# Altium footprint library Terminal_Blocks_Pluggable PCB_5.08mm.PcbLib: 299 footprints (part 3 of 19)
Each footprint in its own frame and in the unit in brackets; x right, y up, seen from the top. Pads: shape width x height; smd on the part's side, far side on the other; paste and mask are expansions set on the pad; w line width, h text height; cw(c..) or ccw(c..) is an arc to the next point about the centre after c.
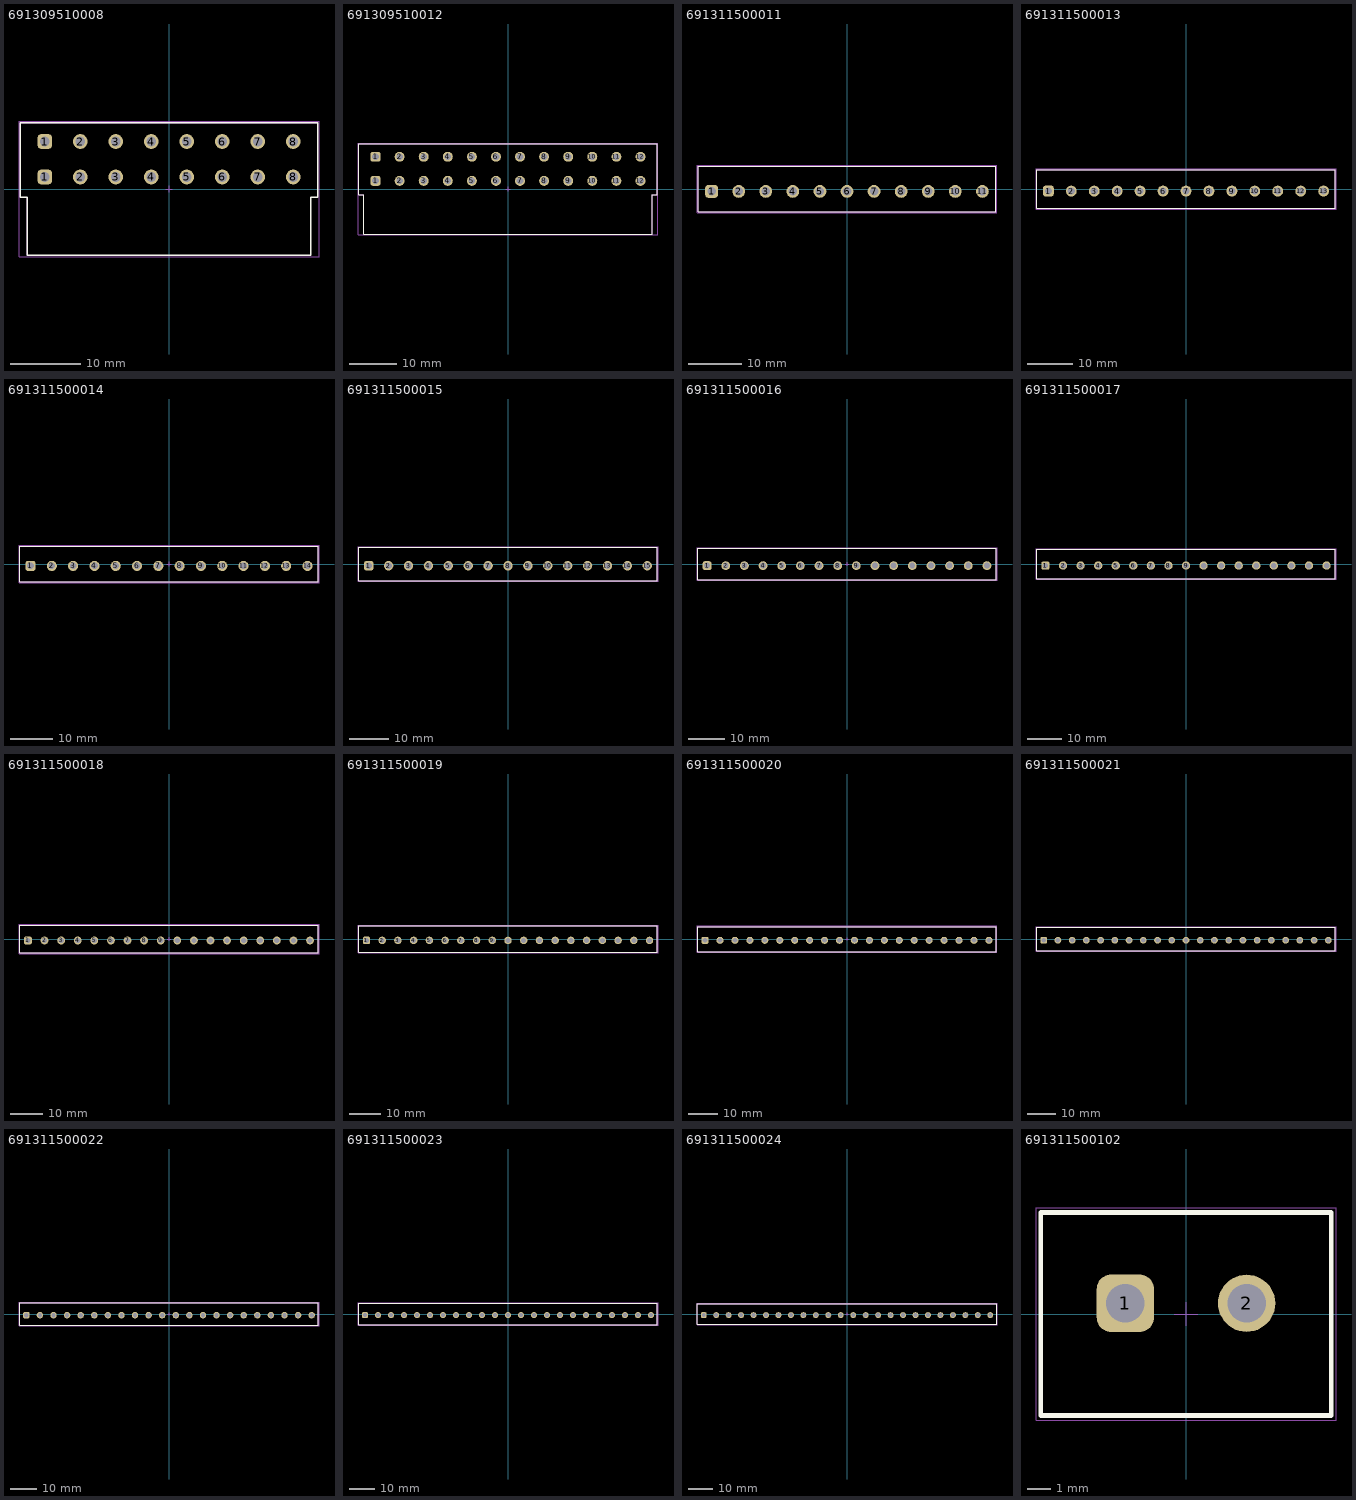
[diagram p2: the footprints below, top view; thin cyan lines are the x and y axes]

## 691309510008 [mm] "5.08 mm Reversed Gender Horizontal PCB Header - 08p"
height 8.6
pads (16):
  rrect50% 2.1x2.1 hole 1.4: 1(-17.78,1.72) 1(-17.78,6.8)
  round 2.1 hole 1.4: 2(-12.7,1.72) 2(-12.7,6.8) 3(-7.62,1.72) 3(-7.62,6.8) 4(-2.54,1.72) 4(-2.54,6.8) 5(2.54,1.72) 5(2.54,6.8) 6(7.62,1.72) 6(7.62,6.8) 7(12.7,1.72) 7(12.7,6.8) 8(17.78,1.72) 8(17.78,6.8)
Top Overlay:
  lines w0.2: -21.28,-1.2 -20.28,-1.2 -20.28,-9.5 20.28,-9.5 20.28,-1.2 21.28,-1.2 21.28,9.5 -21.28,9.5 -21.28,-1.2
Top Designator:
  text ".Designator" at -7.498,-0.5 h1.5
Top Component Outline:
  lines w0.1: -21.28,-1.2 -21.28,9.5 21.28,9.5 21.28,-1.2 20.28,-1.2 20.28,-9.5 -20.28,-9.5 -20.28,-1.2 -21.28,-1.2
Top 3D Body:
  lines w0.1: -21.28,-1.2 -20.28,-1.2 -20.28,-9.5 20.28,-9.5 20.28,-1.2 21.28,-1.2 21.28,9.5 -21.28,9.5 -21.28,-1.2
Top Courtyard:
  lines w0.05: -21.48,-9.7 21.48,-9.7 21.48,9.7 -21.48,9.7 -21.48,-9.7
Top Component Center:
  lines w0.05: -0.5,0 0.5,0 ; 0,-0.5 0,0.5
3D body "691309510008.stp": height 10.94, standoff -3.55, extent -21.28,-9.5 21.28,9.5

## 691309510012 [mm] "5.08 mm Reversed Gender Horizontal PCB Header - 12p"
height 8.6
pads (24):
  rrect50% 2.1x2.1 hole 1.4: 1(-27.94,1.72) 1(-27.94,6.8)
  round 2.1 hole 1.4: 2(-22.86,1.72) 2(-22.86,6.8) 3(-17.78,1.72) 3(-17.78,6.8) 4(-12.7,1.72) 4(-12.7,6.8) 5(-7.62,1.72) 5(-7.62,6.8) 6(-2.54,1.72) 6(-2.54,6.8) 7(2.54,1.72) 7(2.54,6.8) 8(7.62,1.72) 8(7.62,6.8) 9(12.7,1.72) 9(12.7,6.8) 10(17.78,1.72) 10(17.78,6.8) 11(22.86,1.72) 11(22.86,6.8) 12(27.94,1.72) 12(27.94,6.8)
Top Overlay:
  lines w0.2: -31.44,-1.2 -31.44,9.5 31.44,9.5 31.44,-1.2 30.44,-1.2 30.44,-9.5 -30.44,-9.5 -30.44,-1.2 -31.44,-1.2
Top Designator:
  text ".Designator" at -7.498,-0.5 h1.5
Top Component Outline:
  lines w0.1: -31.44,-1.2 -30.44,-1.2 -30.44,-9.5 30.44,-9.5 30.44,-1.2 31.44,-1.2 31.44,9.5 -31.44,9.5 -31.44,-1.2
Top 3D Body:
  lines w0.1: -31.44,-1.2 -31.44,9.5 31.44,9.5 31.44,-1.2 30.44,-1.2 30.44,-9.5 -30.44,-9.5 -30.44,-1.2 -31.44,-1.2
Top Courtyard:
  lines w0.05: -31.64,-9.7 -31.64,9.7 31.64,9.7 31.64,-9.7 -31.64,-9.7
Top Component Center:
  lines w0.05: -0.5,0 0.5,0 ; 0,-0.5 0,0.5
3D body "691309510012.stp": height 10.94, standoff -3.55, extent -31.44,-9.5 31.44,9.5

## 691311500011 [mm] "5,08mm - PCB Headers - Vertical - Opened ends -11p"
height 12
pads (11):
  rrect50% 2.4x2.4 hole 1.6: 1(-25.4,-0.45)
  round 2.4 hole 1.6: 2(-20.32,-0.45) 3(-15.24,-0.45) 4(-10.16,-0.45) 5(-5.08,-0.45) 6(0,-0.45) 7(5.08,-0.45) 8(10.16,-0.45) 9(15.24,-0.45) 10(20.32,-0.45) 11(25.4,-0.45)
Top Overlay:
  lines w0.2: -27.94,-4.25 27.94,-4.25 27.94,4.25 -27.94,4.25 -27.94,-4.25
Top Designator:
  text ".Designator" at -7.498,-0.5 h1.5
Top Component Outline:
  lines w0.1: -27.94,-4.25 -27.94,4.25 27.94,4.25 27.94,-4.25 -27.94,-4.25
Top 3D Body:
  lines w0.1: -27.94,-4.25 27.94,-4.25 27.94,4.25 -27.94,4.25 -27.94,-4.25
Top Courtyard:
  lines w0.05: -28.14,-4.45 28.14,-4.45 28.14,4.45 -28.14,4.45 -28.14,-4.45
Top Component Center:
  lines w0.05: -0.5,0 0.5,0 ; 0,-0.5 0,0.5
3D body "691311500011.stp": height 12.05, standoff -3.95, extent -27.94,-4.25 27.94,4.25

## 691311500013 [mm] "5,08mm - PCB Headers - Vertical - Opened ends -13p"
height 12
pads (13):
  rrect50% 2.4x2.4 hole 1.6: 1(-30.48,-0.45)
  round 2.4 hole 1.6: 2(-25.4,-0.45) 3(-20.32,-0.45) 4(-15.24,-0.45) 5(-10.16,-0.45) 6(-5.08,-0.45) 7(0,-0.45) 8(5.08,-0.45) 9(10.16,-0.45) 10(15.24,-0.45) 11(20.32,-0.45) 12(25.4,-0.45) 13(30.48,-0.45)
Top Overlay:
  lines w0.2: -33.02,-4.25 -33.02,4.25 33.02,4.25 33.02,-4.25 -33.02,-4.25
Top Designator:
  text ".Designator" at -7.498,-0.5 h1.5
Top Component Outline:
  lines w0.1: -33.02,-4.25 33.02,-4.25 33.02,4.25 -33.02,4.25 -33.02,-4.25
Top 3D Body:
  lines w0.1: -33.02,-4.25 -33.02,4.25 33.02,4.25 33.02,-4.25 -33.02,-4.25
Top Courtyard:
  lines w0.05: -33.22,-4.45 -33.22,4.45 33.22,4.45 33.22,-4.45 -33.22,-4.45
Top Component Center:
  lines w0.05: -0.5,0 0.5,0 ; 0,-0.5 0,0.5
3D body "691311500013.stp": height 12.05, standoff -3.95, extent -33.02,-4.25 33.02,4.25

## 691311500014 [mm] "5,08mm - PCB Headers - Vertical - Opened ends -14p"
height 12
pads (14):
  rrect50% 2.4x2.4 hole 1.6: 1(-33.02,-0.45)
  round 2.4 hole 1.6: 2(-27.94,-0.45) 3(-22.86,-0.45) 4(-17.78,-0.45) 5(-12.7,-0.45) 6(-7.62,-0.45) 7(-2.54,-0.45) 8(2.54,-0.45) 9(7.62,-0.45) 10(12.7,-0.45) 11(17.78,-0.45) 12(22.86,-0.45) 13(27.94,-0.45) 14(33.02,-0.45)
Top Overlay:
  lines w0.2: -35.56,-4.25 -35.56,4.25 35.56,4.25 35.56,-4.25 -35.56,-4.25
Top Designator:
  text ".Designator" at -7.498,-0.5 h1.5
Top Component Outline:
  lines w0.1: -35.56,-4.25 35.56,-4.25 35.56,4.25 -35.56,4.25 -35.56,-4.25
Top 3D Body:
  lines w0.1: -35.56,-4.25 -35.56,4.25 35.56,4.25 35.56,-4.25 -35.56,-4.25
Top Courtyard:
  lines w0.05: -35.76,-4.45 -35.76,4.45 35.76,4.45 35.76,-4.45 -35.76,-4.45
Top Component Center:
  lines w0.05: -0.5,0 0.5,0 ; 0,-0.5 0,0.5
3D body "691311500014.stp": height 12.05, standoff -3.95, extent -35.56,-4.25 35.56,4.25

## 691311500015 [mm] "5,08mm - PCB Headers - Vertical - Opened ends -15p"
height 12
pads (15):
  rrect50% 2.4x2.4 hole 1.6: 1(-35.56,-0.45)
  round 2.4 hole 1.6: 2(-30.48,-0.45) 3(-25.4,-0.45) 4(-20.32,-0.45) 5(-15.24,-0.45) 6(-10.16,-0.45) 7(-5.08,-0.45) 8(0,-0.45) 9(5.08,-0.45) 10(10.16,-0.45) 11(15.24,-0.45) 12(20.32,-0.45) 13(25.4,-0.45) 14(30.48,-0.45) 15(35.56,-0.45)
Top Overlay:
  lines w0.2: -38.1,-4.25 38.1,-4.25 38.1,4.25 -38.1,4.25 -38.1,-4.25
Top Designator:
  text ".Designator" at -7.498,-0.5 h1.5
Top Component Outline:
  lines w0.1: -38.1,-4.25 -38.1,4.25 38.1,4.25 38.1,-4.25 -38.1,-4.25
Top 3D Body:
  lines w0.1: -38.1,-4.25 38.1,-4.25 38.1,4.25 -38.1,4.25 -38.1,-4.25
Top Courtyard:
  lines w0.05: -38.3,-4.45 38.3,-4.45 38.3,4.45 -38.3,4.45 -38.3,-4.45
Top Component Center:
  lines w0.05: -0.5,0 0.5,0 ; 0,-0.5 0,0.5
3D body "691311500015.stp": height 12.05, standoff -3.95, extent -38.1,-4.25 38.1,4.25

## 691311500016 [mm] "5,08mm - PCB Headers - Vertical - Opened ends -16p"
height 12
pads (16):
  rrect50% 2.4x2.4 hole 1.6: 1(-38.1,-0.45)
  round 2.4 hole 1.6: 2(-33.02,-0.45) 3(-27.94,-0.45) 4(-22.86,-0.45) 5(-17.78,-0.45) 6(-12.7,-0.45) 7(-7.62,-0.45) 8(-2.54,-0.45) 9(2.54,-0.45) 10(7.62,-0.45) 11(12.7,-0.45) 12(17.78,-0.45) 13(22.86,-0.45) 14(27.94,-0.45) 15(33.02,-0.45) 16(38.1,-0.45)
Top Overlay:
  lines w0.2: -40.64,-4.25 -40.64,4.25 40.64,4.25 40.64,-4.25 -40.64,-4.25
Top Designator:
  text ".Designator" at -7.498,-0.5 h1.5
Top Component Outline:
  lines w0.1: -40.64,-4.25 40.64,-4.25 40.64,4.25 -40.64,4.25 -40.64,-4.25
Top 3D Body:
  lines w0.1: -40.64,-4.25 -40.64,4.25 40.64,4.25 40.64,-4.25 -40.64,-4.25
Top Courtyard:
  lines w0.05: -40.84,-4.45 -40.84,4.45 40.84,4.45 40.84,-4.45 -40.84,-4.45
Top Component Center:
  lines w0.05: -0.5,0 0.5,0 ; 0,-0.5 0,0.5
3D body "691311500016.stp": height 12.05, standoff -3.95, extent -40.64,-4.25 40.64,4.25

## 691311500017 [mm] "5,08mm - PCB Headers - Vertical - Opened ends -17p"
height 12
pads (17):
  rrect50% 2.4x2.4 hole 1.6: 1(-40.64,-0.45)
  round 2.4 hole 1.6: 2(-35.56,-0.45) 3(-30.48,-0.45) 4(-25.4,-0.45) 5(-20.32,-0.45) 6(-15.24,-0.45) 7(-10.16,-0.45) 8(-5.08,-0.45) 9(0,-0.45) 10(5.08,-0.45) 11(10.16,-0.45) 12(15.24,-0.45) 13(20.32,-0.45) 14(25.4,-0.45) 15(30.48,-0.45) 16(35.56,-0.45) 17(40.64,-0.45)
Top Overlay:
  lines w0.2: -43.18,-4.25 43.18,-4.25 43.18,4.25 -43.18,4.25 -43.18,-4.25
Top Designator:
  text ".Designator" at -7.498,-0.5 h1.5
Top Component Outline:
  lines w0.1: -43.18,-4.25 -43.18,4.25 43.18,4.25 43.18,-4.25 -43.18,-4.25
Top 3D Body:
  lines w0.1: -43.18,-4.25 43.18,-4.25 43.18,4.25 -43.18,4.25 -43.18,-4.25
Top Courtyard:
  lines w0.05: -43.38,-4.45 43.38,-4.45 43.38,4.45 -43.38,4.45 -43.38,-4.45
Top Component Center:
  lines w0.05: -0.5,0 0.5,0 ; 0,-0.5 0,0.5
3D body "691311500017.stp": height 12.05, standoff -3.95, extent -43.18,-4.25 43.18,4.25

## 691311500018 [mm] "5,08mm - PCB Headers - Vertical - Opened ends -18p"
height 12
pads (18):
  rrect50% 2.4x2.4 hole 1.6: 1(-43.18,-0.45)
  round 2.4 hole 1.6: 2(-38.1,-0.45) 3(-33.02,-0.45) 4(-27.94,-0.45) 5(-22.86,-0.45) 6(-17.78,-0.45) 7(-12.7,-0.45) 8(-7.62,-0.45) 9(-2.54,-0.45) 10(2.54,-0.45) 11(7.62,-0.45) 12(12.7,-0.45) 13(17.78,-0.45) 14(22.86,-0.45) 15(27.94,-0.45) 16(33.02,-0.45) 17(38.1,-0.45) 18(43.18,-0.45)
Top Overlay:
  lines w0.2: -45.72,-4.25 -45.72,4.25 45.72,4.25 45.72,-4.25 -45.72,-4.25
Top Designator:
  text ".Designator" at -7.498,-0.5 h1.5
Top Component Outline:
  lines w0.1: -45.72,-4.25 45.72,-4.25 45.72,4.25 -45.72,4.25 -45.72,-4.25
Top 3D Body:
  lines w0.1: -45.72,-4.25 -45.72,4.25 45.72,4.25 45.72,-4.25 -45.72,-4.25
Top Courtyard:
  lines w0.05: -45.92,-4.45 -45.92,4.45 45.92,4.45 45.92,-4.45 -45.92,-4.45
Top Component Center:
  lines w0.05: -0.5,0 0.5,0 ; 0,-0.5 0,0.5
3D body "691311500018.stp": height 12.05, standoff -3.95, extent -45.72,-4.25 45.72,4.25

## 691311500019 [mm] "5,08mm - PCB Headers - Vertical - Opened ends -19p"
height 12
pads (19):
  rrect50% 2.4x2.4 hole 1.6: 1(-45.72,-0.45)
  round 2.4 hole 1.6: 2(-40.64,-0.45) 3(-35.56,-0.45) 4(-30.48,-0.45) 5(-25.4,-0.45) 6(-20.32,-0.45) 7(-15.24,-0.45) 8(-10.16,-0.45) 9(-5.08,-0.45) 10(0,-0.45) 11(5.08,-0.45) 12(10.16,-0.45) 13(15.24,-0.45) 14(20.32,-0.45) 15(25.4,-0.45) 16(30.48,-0.45) 17(35.56,-0.45) 18(40.64,-0.45) 19(45.72,-0.45)
Top Overlay:
  lines w0.2: -48.26,-4.25 48.26,-4.25 48.26,4.25 -48.26,4.25 -48.26,-4.25
Top Designator:
  text ".Designator" at -7.498,-0.5 h1.5
Top Component Outline:
  lines w0.1: -48.26,-4.25 -48.26,4.25 48.26,4.25 48.26,-4.25 -48.26,-4.25
Top 3D Body:
  lines w0.1: -48.26,-4.25 48.26,-4.25 48.26,4.25 -48.26,4.25 -48.26,-4.25
Top Courtyard:
  lines w0.05: -48.46,-4.45 48.46,-4.45 48.46,4.45 -48.46,4.45 -48.46,-4.45
Top Component Center:
  lines w0.05: -0.5,0 0.5,0 ; 0,-0.5 0,0.5
3D body "691311500019.stp": height 12.05, standoff -3.95, extent -48.26,-4.25 48.26,4.25

## 691311500020 [mm] "5,08mm - PCB Headers - Vertical - Opened ends -20p"
height 12
pads (20):
  rrect50% 2.4x2.4 hole 1.6: 1(-48.26,-0.45)
  round 2.4 hole 1.6: 2(-43.18,-0.45) 3(-38.1,-0.45) 4(-33.02,-0.45) 5(-27.94,-0.45) 6(-22.86,-0.45) 7(-17.78,-0.45) 8(-12.7,-0.45) 9(-7.62,-0.45) 10(-2.54,-0.45) 11(2.54,-0.45) 12(7.62,-0.45) 13(12.7,-0.45) 14(17.78,-0.45) 15(22.86,-0.45) 16(27.94,-0.45) 17(33.02,-0.45) 18(38.1,-0.45) 19(43.18,-0.45) 20(48.26,-0.45)
Top Overlay:
  lines w0.2: -50.8,-4.25 50.8,-4.25 50.8,4.25 -50.8,4.25 -50.8,-4.25
Top Designator:
  text ".Designator" at -7.498,-0.5 h1.5
Top Component Outline:
  lines w0.1: -50.8,-4.25 -50.8,4.25 50.8,4.25 50.8,-4.25 -50.8,-4.25
Top 3D Body:
  lines w0.1: -50.8,-4.25 50.8,-4.25 50.8,4.25 -50.8,4.25 -50.8,-4.25
Top Courtyard:
  lines w0.05: -51,-4.45 51,-4.45 51,4.45 -51,4.45 -51,-4.45
Top Component Center:
  lines w0.05: -0.5,0 0.5,0 ; 0,-0.5 0,0.5
3D body "691311500020.stp": height 12.05, standoff -3.95, extent -50.8,-4.25 50.8,4.25

## 691311500021 [mm] "5,08mm - PCB Headers - Vertical - Opened ends -21p"
height 12
pads (21):
  rrect50% 2.4x2.4 hole 1.6: 1(-50.8,-0.45)
  round 2.4 hole 1.6: 2(-45.72,-0.45) 3(-40.64,-0.45) 4(-35.56,-0.45) 5(-30.48,-0.45) 6(-25.4,-0.45) 7(-20.32,-0.45) 8(-15.24,-0.45) 9(-10.16,-0.45) 10(-5.08,-0.45) 11(0,-0.45) 12(5.08,-0.45) 13(10.16,-0.45) 14(15.24,-0.45) 15(20.32,-0.45) 16(25.4,-0.45) 17(30.48,-0.45) 18(35.56,-0.45) 19(40.64,-0.45) 20(45.72,-0.45) 21(50.8,-0.45)
Top Overlay:
  lines w0.2: -53.34,-4.25 53.34,-4.25 53.34,4.25 -53.34,4.25 -53.34,-4.25
Top Designator:
  text ".Designator" at -7.498,-0.5 h1.5
Top Component Outline:
  lines w0.1: -53.34,-4.25 -53.34,4.25 53.34,4.25 53.34,-4.25 -53.34,-4.25
Top 3D Body:
  lines w0.1: -53.34,-4.25 53.34,-4.25 53.34,4.25 -53.34,4.25 -53.34,-4.25
Top Courtyard:
  lines w0.05: -53.54,-4.45 53.54,-4.45 53.54,4.45 -53.54,4.45 -53.54,-4.45
Top Component Center:
  lines w0.05: -0.5,0 0.5,0 ; 0,-0.5 0,0.5
3D body "691311500021.stp": height 12.05, standoff -3.95, extent -53.34,-4.25 53.34,4.25

## 691311500022 [mm] "5,08mm - PCB Headers - Vertical - Opened ends -22p"
height 12
pads (22):
  rrect50% 2.4x2.4 hole 1.6: 1(-53.34,-0.45)
  round 2.4 hole 1.6: 2(-48.26,-0.45) 3(-43.18,-0.45) 4(-38.1,-0.45) 5(-33.02,-0.45) 6(-27.94,-0.45) 7(-22.86,-0.45) 8(-17.78,-0.45) 9(-12.7,-0.45) 10(-7.62,-0.45) 11(-2.54,-0.45) 12(2.54,-0.45) 13(7.62,-0.45) 14(12.7,-0.45) 15(17.78,-0.45) 16(22.86,-0.45) 17(27.94,-0.45) 18(33.02,-0.45) 19(38.1,-0.45) 20(43.18,-0.45) 21(48.26,-0.45) 22(53.34,-0.45)
Top Overlay:
  lines w0.2: -55.88,-4.25 -55.88,4.25 55.88,4.25 55.88,-4.25 -55.88,-4.25
Top Designator:
  text ".Designator" at -7.498,-0.5 h1.5
Top Component Outline:
  lines w0.1: -55.88,-4.25 55.88,-4.25 55.88,4.25 -55.88,4.25 -55.88,-4.25
Top 3D Body:
  lines w0.1: -55.88,-4.25 -55.88,4.25 55.88,4.25 55.88,-4.25 -55.88,-4.25
Top Courtyard:
  lines w0.05: -56.08,-4.45 -56.08,4.45 56.08,4.45 56.08,-4.45 -56.08,-4.45
Top Component Center:
  lines w0.05: -0.5,0 0.5,0 ; 0,-0.5 0,0.5
3D body "691311500022.stp": height 12.05, standoff -3.95, extent -55.88,-4.25 55.88,4.25

## 691311500023 [mm] "5,08mm - PCB Headers - Vertical - Opened ends -23p"
height 12
pads (23):
  rrect50% 2.4x2.4 hole 1.6: 1(-55.88,-0.45)
  round 2.4 hole 1.6: 2(-50.8,-0.45) 3(-45.72,-0.45) 4(-40.64,-0.45) 5(-35.56,-0.45) 6(-30.48,-0.45) 7(-25.4,-0.45) 8(-20.32,-0.45) 9(-15.24,-0.45) 10(-10.16,-0.45) 11(-5.08,-0.45) 12(0,-0.45) 13(5.08,-0.45) 14(10.16,-0.45) 15(15.24,-0.45) 16(20.32,-0.45) 17(25.4,-0.45) 18(30.48,-0.45) 19(35.56,-0.45) 20(40.64,-0.45) 21(45.72,-0.45) 22(50.8,-0.45) 23(55.88,-0.45)
Top Overlay:
  lines w0.2: -58.42,-4.25 -58.42,4.25 58.42,4.25 58.42,-4.25 -58.42,-4.25
Top Designator:
  text ".Designator" at -7.498,-0.5 h1.5
Top Component Outline:
  lines w0.1: -58.42,-4.25 58.42,-4.25 58.42,4.25 -58.42,4.25 -58.42,-4.25
Top 3D Body:
  lines w0.1: -58.42,-4.25 -58.42,4.25 58.42,4.25 58.42,-4.25 -58.42,-4.25
Top Courtyard:
  lines w0.05: -58.62,-4.45 -58.62,4.45 58.62,4.45 58.62,-4.45 -58.62,-4.45
Top Component Center:
  lines w0.05: -0.5,0 0.5,0 ; 0,-0.5 0,0.5
3D body "691311500023.stp": height 12.05, standoff -3.95, extent -58.42,-4.25 58.42,4.25

## 691311500024 [mm] "5,08mm - PCB Headers - Vertical - Opened ends -24p"
height 12
pads (24):
  rrect50% 2.4x2.4 hole 1.6: 1(-58.42,-0.45)
  round 2.4 hole 1.6: 2(-53.34,-0.45) 3(-48.26,-0.45) 4(-43.18,-0.45) 5(-38.1,-0.45) 6(-33.02,-0.45) 7(-27.94,-0.45) 8(-22.86,-0.45) 9(-17.78,-0.45) 10(-12.7,-0.45) 11(-7.62,-0.45) 12(-2.54,-0.45) 13(2.54,-0.45) 14(7.62,-0.45) 15(12.7,-0.45) 16(17.78,-0.45) 17(22.86,-0.45) 18(27.94,-0.45) 19(33.02,-0.45) 20(38.1,-0.45) 21(43.18,-0.45) 22(48.26,-0.45) 23(53.34,-0.45) 24(58.42,-0.45)
Top Overlay:
  lines w0.2: -60.96,-4.25 60.96,-4.25 60.96,4.25 -60.96,4.25 -60.96,-4.25
Top Designator:
  text ".Designator" at -7.498,-0.5 h1.5
Top Component Outline:
  lines w0.1: -60.96,-4.25 -60.96,4.25 60.96,4.25 60.96,-4.25 -60.96,-4.25
Top 3D Body:
  lines w0.1: -60.96,-4.25 60.96,-4.25 60.96,4.25 -60.96,4.25 -60.96,-4.25
Top Courtyard:
  lines w0.05: -61.16,-4.45 61.16,-4.45 61.16,4.45 -61.16,4.45 -61.16,-4.45
Top Component Center:
  lines w0.05: -0.5,0 0.5,0 ; 0,-0.5 0,0.5
3D body "691311500024.stp": height 12.05, standoff -3.95, extent -60.96,-4.25 60.96,4.25

## 691311500102 [mm] "5,08mm - PCB Headers - Vertical - Closed ends -02p"
height 12
pads (2):
  rrect50% 2.4x2.4 hole 1.6: 1(-2.54,0.45)
  round 2.4 hole 1.6: 2(2.54,0.45)
Top Overlay:
  lines w0.2: -6.08,-4.25 -6.08,4.25 6.08,4.25 6.08,-4.25 -6.08,-4.25
Top Designator:
  text ".Designator" at -7.498,-0.5 h1.5
Top Component Outline:
  lines w0.1: -6.08,-4.25 6.08,-4.25 6.08,4.25 -6.08,4.25 -6.08,-4.25
Top 3D Body:
  lines w0.1: -6.08,-4.25 -6.08,4.25 6.08,4.25 6.08,-4.25 -6.08,-4.25
Top Courtyard:
  lines w0.05: -6.28,-4.45 -6.28,4.45 6.28,4.45 6.28,-4.45 -6.28,-4.45
Top Component Center:
  lines w0.05: -0.5,0 0.5,0 ; 0,-0.5 0,0.5
3D body "691311500102.stp": height 12.05, standoff -3.95, extent -6.08,-4.25 6.08,4.25